# Altium integrated library LIS3MDL.IntLib: 1 symbol
Pins are listed as number, name and electrical type; pins without a type are passive.

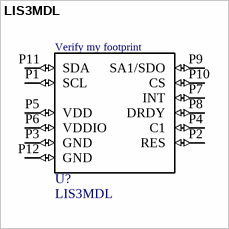
[diagram p0: symbol LIS3MDL]

## LIS3MDL
designator U?
/ LIS3MDL - Magnetic, Magnetometer Sensor Evaluation Board /; MF: STMicroelectronics; Price: None; Package: VFLGA-12 STMicroelectronics; MP: LIS3MDL; Availability: Unavailable; SnapEDA_Link: https://www.snapeda.com/parts/LIS3MDL/STMicroelectronics/view-part/103743/?ref=snap; Value: *
footprint *LGA12_ST_LIS3MDL(Primary)
pins: P1 SCL (io), P2 RES (io), P3 GND (io), P4 C1 (io), P5 VDD (io), P6 VDDIO (io), P7 INT (io), P8 DRDY (io), P9 SA1/SDO (io), P10 CS (io), P11 SDA (io), P12 GND (io)
text: Verify my footprint